# Altium schematic symbol library GD25Q128ESIGR.SchLib: 1 symbol
Pins are listed as number, name and electrical type; pins without a type are passive.

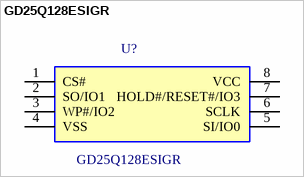
[diagram p0: symbol GD25Q128ESIGR]

## GD25Q128ESIGR
designator U?
Manufacturer: GigaDevice Semicon Beijing; Value: GD25Q128ESIGR; MPN: GD25Q128ESIGR; LCSC Part #: C2928891; Manufacturer Part Number: GD25Q128ESIGR
footprint SOIC-8_3.9x4.9mm_P1.27mm
pins: 1 CS#, 2 SO/IO1, 3 WP#/IO2, 4 VSS (power), 5 SI/IO0, 6 SCLK, 7 HOLD#/RESET#/IO3, 8 VCC (power)